# Altium footprint library SY8286A.PcbLib: 1 footprints
Each footprint in its own frame and in the unit in brackets; x right, y up, seen from the top. Pads: shape width x height; smd on the part's side, far side on the other; paste and mask are expansions set on the pad; w line width, h text height; cw(c..) or ccw(c..) is an arc to the next point about the centre after c.
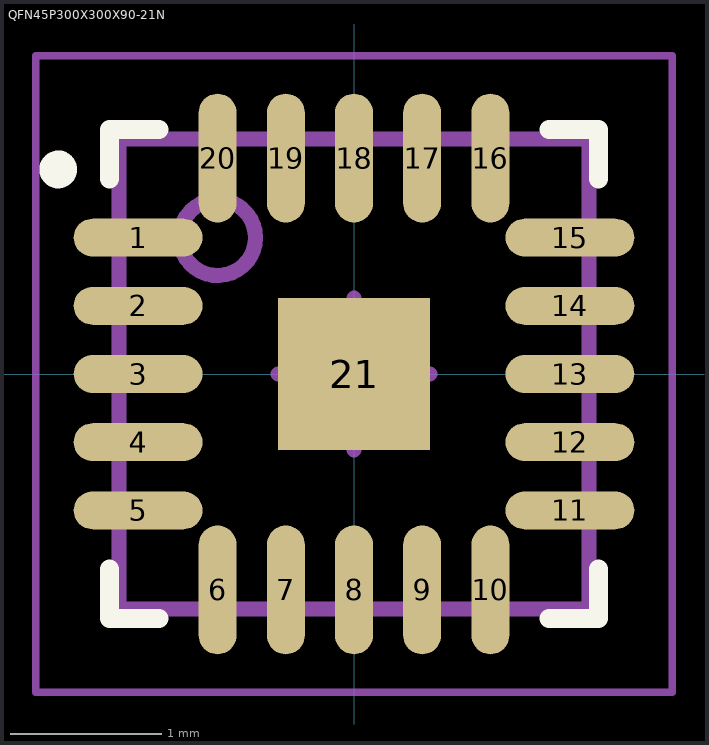
[diagram p0: the footprint, top view; thin cyan lines are the x and y axes]

## QFN45P300X300X90-21N [mm] "QFN, 20-Leads, Body 3.00x3.00mm, Pitch 0.45mm, Thermal Pad 1.00x1.00mm, IPC Medium Density"
height 0.9
pads (21):
  oval 0.85x0.25 smd: 1(-1.425,0.9) 2(-1.425,0.45) 3(-1.425,0) 4(-1.425,-0.45) 5(-1.425,-0.9) 11(1.425,-0.9) 12(1.425,-0.45) 13(1.425,0) 14(1.425,0.45) 15(1.425,0.9)
  oval 0.25x0.85 smd: 6(-0.9,-1.425) 7(-0.45,-1.425) 8(0,-1.425) 9(0.45,-1.425) 10(0.9,-1.425) 16(0.9,1.425) 17(0.45,1.425) 18(0,1.425) 19(-0.45,1.425) 20(-0.9,1.425)
  rect 1x1 smd paste-0.082: 21(0,0)
Top Overlay:
  circle w0.125: c-1.952,1.35 r0.062
  lines w0.127: -1.614,-1.288 -1.614,-1.613 -1.289,-1.613 ; -1.614,1.289 -1.614,1.614 -1.289,1.614 ; 1.288,-1.613 1.613,-1.613 1.613,-1.288 ; 1.288,1.614 1.613,1.614 1.613,1.289
Mechanical 13:
  circle w0.1: c-0.9,0.9 r0.25
  lines w0.1: -1.55,-1.55 -1.55,1.55 1.55,1.55 1.55,-1.55 -1.55,-1.55
Mechanical 15:
  lines w0.05: -2.1,-2.1 -2.1,2.1 2.1,2.1 2.1,-2.1 -2.1,-2.1
  lines w0.1: -0.5,0 0.5,0 ; 0,-0.5 0,0.5
3D body: height 0.9, standoff 0, extent -1.55,-1.55 1.55,1.55